# Altium schematic symbol library MacroPlay.SchLib: 48 symbols (part 1 of 2)
Pins are listed as number, name and electrical type; pins without a type are passive.

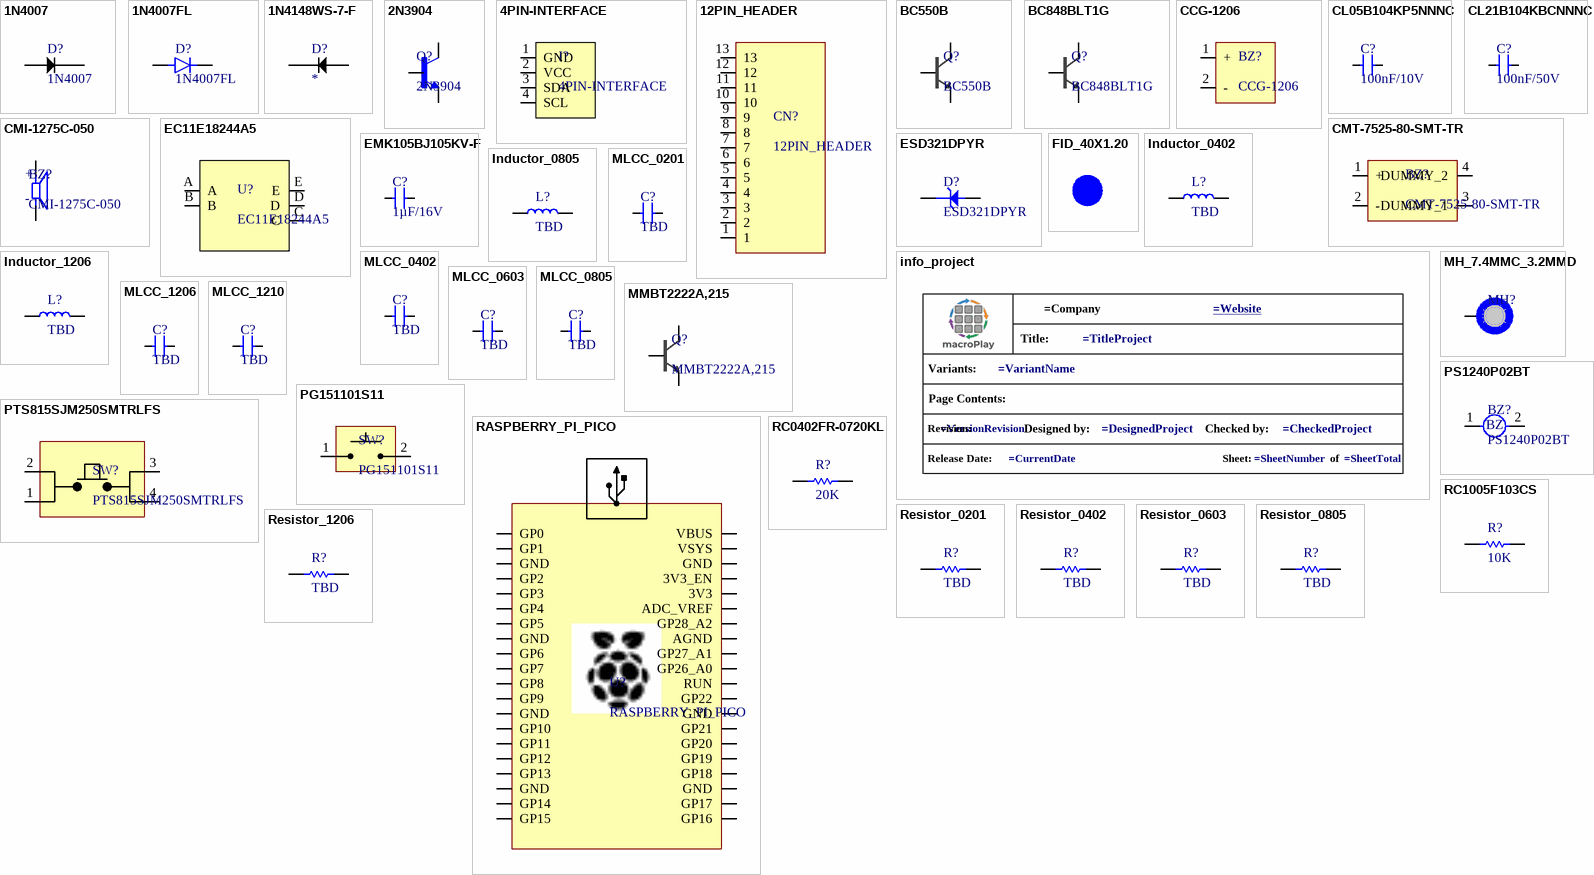
[diagram p0: symbols 1N4007 to Resistor_1206]

## 1N4007
designator D?
DIODE - Rectifier Diode, 1 Phase, 1 Element, 1A, 1000V V(RRM), Silicon, DO-204AC; Manufacturer: Diotec; Manufacturer Lifecycle Status: ACTIVE; Value: 15pF; Element Configuration: Single; Forward Voltage: 1V; Max Forward Surge Current (Ifsm): 30A; Max Junction Temperature (Tj): 175°C; Max Repetitive Reverse Voltage (Vrrm): 1kV; Max Surge Current: 27A; Number of Elements: 1; Peak Reverse Current: 5µA; Polarity: Standard; Reverse Recovery Time: 1.5µs; .Mounting: PTH; Supplier: Arrow Electronics; Supplier Part Number: 1N4007; Manufacturer Part Number: 1N4007; RoHS: Compliant; Category: Rectifier Diodes; Stock: 2542; Pricing: 1=0,1243, 10=0,0773, 100=0,0477, 500=0,0345, 1000=0,0301, 2000=0,0264 (USD); Case/Package: Axial; Export Control Classification Number (ECCN) Code: EAR99; Forward Current: 1A; Height: 2.8mm; Harmonized Tariff Schedule (HTS) Code: 85411000; Introduction Date: 1988-05-01; Lifecycle Status: Production; Max Operating Temperature: 175°C; Max Output current: 1A; Min Operating Temperature: -50°C; Mounting Technology: Axial; Pins: 2; Number of Terminals: 2; Peak Non-Repetitive Surge Current: 30A; REACH SVHC: Unknown; Reverse Standoff Voltage: 1kV; Reverse Voltage: 1kV; Weight: 300mg; ComponentLink1URL: https://datasheet.octopart.com:443/1N4007-Diotec-datasheet-180572013.pdf?src-supplier=IHS; ComponentLink1Description: https://datasheet.octopart.com:443/1N4007-Diotec-datasheet-180572013.pdf?src-supplier=IHS; ComponentLink2URL: https://datasheet.octopart.com:443/1N4007-Diotec-datasheet-180725457.pdf?src-supplier=IHS; ComponentLink2Description: https://datasheet.octopart.com:443/1N4007-Diotec-datasheet-180725457.pdf?src-supplier=IHS; ComponentLink3URL: https://datasheet.octopart.com:443/1N4007-Diotec-datasheet-182232370.pdf?src-supplier=IHS; ComponentLink3Description: https://datasheet.octopart.com:443/1N4007-Diotec-datasheet-182232370.pdf?src-supplier=IHS; ComponentLink4URL: https://datasheet.octopart.com:443/1N4007-Diotec-datasheet-180570705.pdf?src-supplier=IHS; ComponentLink4Description: https://datasheet.octopart.com:443/1N4007-Diotec-datasheet-180570705.pdf?src-supplier=IHS; ComponentLink5URL: https://datasheet.octopart.com:443/1N4007-Diotec-datasheet-62346875.pdf?src-supplier=Burklin+Elektronik; ComponentLink5Description: https://datasheet.octopart.com:443/1N4007-Diotec-datasheet-62346875.pdf?src-supplier=Burklin+Elektronik; ComponentLink6URL: https://datasheet.octopart.com:443/1N4007-Diotec-datasheet-168809440.pdf?src-supplier=Diotec; ComponentLink6Description: https://datasheet.octopart.com:443/1N4007-Diotec-datasheet-168809440.pdf?src-supplier=Diotec; ComponentLink7URL: https://datasheet.octopart.com:443/1N4007-Diotec-datasheet-114842631.pdf?src-supplier=SOS+electronic; ComponentLink7Description: https://datasheet.octopart.com:443/1N4007-Diotec-datasheet-114842631.pdf?src-supplier=SOS+electronic; ComponentLink8URL: https://datasheet.octopart.com:443/1N4007-Galaxy-Semiconductor-datasheet-20771558.pdf?src-supplier=TME; ComponentLink8Description: https://datasheet.octopart.com:443/1N4007-Galaxy-Semiconductor-datasheet-20771558.pdf?src-supplier=TME; ComponentLink9URL: https://datasheet.octopart.com:443/1N4007-Diotec-datasheet-118605333.pdf?src-supplier=TME; ComponentLink9Description: https://datasheet.octopart.com:443/1N4007-Diotec-datasheet-118605333.pdf?src-supplier=TME; ComponentLink10URL: https://datasheet.octopart.com:443/1N4007-Diotec-datasheet-159114366.pdf?src-supplier=TME; ComponentLink10Description: https://datasheet.octopart.com:443/1N4007-Diotec-datasheet-159114366.pdf?src-supplier=TME; ComponentLink11URL: https://datasheet.octopart.com:443/1N4007-Diotec-datasheet-189099566.pdf?src-supplier=Master+Electronics; ComponentLink11Description: https://datasheet.octopart.com:443/1N4007-Diotec-datasheet-189099566.pdf?src-supplier=Master+Electronics; .SCHChecked: *; .PCBChecked: *
footprint DIOAD1060W80L520D270
pins: A 2, C 1

## 1N4007FL
designator D?
Diode - Standard 1000 V 1A Surface Mount SOD-123FL; MF: SMC Diode Solutions; SnapEDA_Link: https://www.snapeda.com/parts/1N4007FL/SMC/view-part/?ref=snap; Package: None; Value: *; MP: 1N4007FL; Check_prices: https://www.snapeda.com/parts/1N4007FL/SMC/view-part/?ref=eda
footprint SODFL3618X110N
pins: 1 K, 2 A

## 1N4148WS-7-F
designator D?
DIODE - Diode 75 V 150mA Surface Mount SOD-323; Manufacturer_Name: Diodes Incorporated; Manufacturer_Part_Number: 1N4148WS-7-F; Datasheet Link: https://www.diodes.com//assets/Datasheets/1N4148WS_BAV16WS.pdf; Height: 1.2mm; Mouser Part Number: 621-1N4148WS-F; Mouser Price/Stock: https://www.mouser.co.uk/ProductDetail/Diodes-Incorporated/1N4148WS-7-F?qs=4drIV0IxA0r8aNy7%2Fu4kVw%3D%3D; Arrow Part Number: 1N4148WS-7-F; Arrow Price/Stock: https://www.arrow.com/en/products/1n4148ws-7-f/diodes-incorporated?utm_currency=USD&region=europe
footprint SOD2513X120N
pins: 1, 2

## 2N3904
designator Q?
TRANS - NPN 40V 200MA TO92-3; MF: Rectron; SnapEDA_Link: https://www.snapeda.com/parts/2N3904/Rectron/view-part/?ref=snap; Package: TO-226-3 Rectron; MP: 2N3904; Check_prices: https://www.snapeda.com/parts/2N3904/Rectron/view-part/?ref=eda; Purchase-URL: https://pricing.snapeda.com/search/part/2N3904/?ref=eda; Price: None; Value: *; Availability: In Stock
footprint TO92127P495H495-3
pins: 1 E, 2 B, 3 C

## 4PIN-INTERFACE
designator I?
SMD Pad to interface with I2C/SPI data peripherals; .SCHChecked: *; .PCBChecked: *; .Mounting: SMD
footprint 4PIN_INTERFACE
pins: 1 GND, 2 VCC, 3 SDA, 4 SCL

## 12PIN_HEADER
designator CN?
12PIN HEADER CONNECTOR
footprint 12PINHEADER
pins: 1, 2, 3, 4, 5, 6, 7, 8, 9, 10, 11, 12, 13

## BC550B
designator Q?
TRANS - NPN Bipolar (BJT) Transistor 45 V 100 mA 300MHz 500 mW Through Hole TO-92-3; MF: ON; .Mounting: PTH; SnapEDA_Link: https://www.snapeda.com/parts/BC550B/Onsemi/view-part/?ref=snap; Package: E-PKG AXIAL-LEADED-2 ON Semiconductor; Value: *; MP: BC550B; Check_prices: https://www.snapeda.com/parts/BC550B/Onsemi/view-part/?ref=eda; .SCHChecked: *; .PCBChecked: *
footprint TO92-
pins: 1 E, 2 B, 3 C

## BC848BLT1G
designator Q?
TRANS - NPN 30V 100mA 300mW SOT23-3.; Manufacturer 1: ON Semiconductor; Emitter Base Voltage (VEBO): 5V; Collector Emitter Saturation Voltage: 600mV; Transition Frequency: 100MHz; hFE Min: 200; Number of Elements: 1; Description 1: NPN Ic=100mA Vceo=30V hfe=200~450 P=225mW SOT-23; Category 1: BJTs; .Mounting: SMT; .PCBChecked: Lucas Vieira; Case/Package: SOT-23-3; Pins: 3; Contact Plating: Tin,Matte; Min Operating Temperature: -55°C; Max Operating Temperature: 150°C; Packaging: Tape and Reel; Polarity: NPN; Collector Emitter Breakdown Voltage: 30V; Max Power Dissipation: 300mW; Package Quantity: 3000; Collector Base Voltage (VCBO): 30V; Max Collector Current: 100mA; Max Breakdown Voltage: 30V; Power Dissipation: 300mW; Clock Frequency: 100MHz; Voltage Rating (DC): 30V; Current Rating: 100mA; Collector-emitter Voltage-Max: 600mV; Series: -; Collector Emitter Voltage (VCEO): 30V; Frequency: 100MHz; Gain Bandwidth Product: 100MHz; Length: 2.9mm; Width: 1.3mm; Height: 0.94mm; Radiation Hardening: No; Lead Free: Lead Free; Reach SVHC Compliant: No; RoHS Compliant: Yes; ComponentLink1URL: https://datasheet.ciiva.com/15139/getdatasheetpartid-87781-15139134.pdf?src-supplier=Verical; ComponentLink1Description: https://datasheet.ciiva.com/15139/getdatasheetpartid-87781-15139134.pdf?src-supplier=Verical; ComponentLink2URL: https://datasheet.ciiva.com/7971/bc846alt1-d-7971962.pdf?src-supplier=Element14; ComponentLink2Description: https://datasheet.ciiva.com/7971/bc846alt1-d-7971962.pdf?src-supplier=Element14; ComponentLink3URL: https://datasheet.ciiva.com/7971/bc846alt1-d-7971960.pdf?src-supplier=Element14; ComponentLink3Description: https://datasheet.ciiva.com/7971/bc846alt1-d-7971960.pdf?src-supplier=Element14; ComponentLink4URL: https://datasheet.ciiva.com/11204/bc846alt1-d-11204358.pdf?src-supplier=Avnet; ComponentLink4Description: https://datasheet.ciiva.com/11204/bc846alt1-d-11204358.pdf?src-supplier=Avnet; ComponentLink5URL: https://datasheet.ciiva.com/11198/bc846alt1-d-11198026.pdf?src-supplier=Avnet; ComponentLink5Description: https://datasheet.ciiva.com/11198/bc846alt1-d-11198026.pdf?src-supplier=Avnet; ComponentLink6URL: https://datasheet.ciiva.com/976/bc846alt1-d-976387.pdf?src-supplier=Digi-Key; ComponentLink6Description: https://datasheet.ciiva.com/976/bc846alt1-d-976387.pdf?src-supplier=Digi-Key; ComponentLink7URL: https://datasheet.ciiva.com/976/bc846alt1-d-976388.pdf?src-supplier=Digi-Key; ComponentLink7Description: https://datasheet.ciiva.com/976/bc846alt1-d-976388.pdf?src-supplier=Digi-Key; ComponentLink8URL: https://datasheet.ciiva.com/976/bc846alt1-d-976386.pdf?src-supplier=Digi-Key; ComponentLink8Description: https://datasheet.ciiva.com/976/bc846alt1-d-976386.pdf?src-supplier=Digi-Key; Supplier 1: Digi-Key; Supplier Part Number 1: BC848BLT1GOSCT-ND; Manufacturer Part Number 1: BC848BLT1G; RoHS 1: Yes; Stock 1: 199953; Pricing 1: 1=0,14, 10=0,131, 100=0,0712, 500=0,04384, 1000=0,02989 (USD); Manufacturer 2: ON Semiconductor; Manufacturer Part Number 2: SBC848BLT1G; Manufacturer 3: Nexperia USA Inc.; Manufacturer Part Number 3: BC848B,215; .SCHChecked: Lucas Vieira
footprint SOT-23-3 (SOT23, 3-Leads, Body 2,90x2,40mm, Pitch 1,05mm, IPC Medium Density)
pins: 1 Base, 2 Emitter, 3 Collector

## CCG-1206
designator BZ?
BUZZER - 12 mm, 5 V, 85 dB, Through Hole, Sealed, Magnetic Audio Transducer Buzzer; MF: Same Sky; .Mounting: PTH; SnapEDA_Link: https://www.snapeda.com/parts/CCG-1206/Same+Sky/view-part/?ref=snap; Package: None; Value: *; MP: CCG-1206; Check_prices: https://www.snapeda.com/parts/CCG-1206/Same+Sky/view-part/?ref=eda; .SCHChecked: *; .PCBChecked: *
footprint CUI_CCG-1206
pins: 1 +, 2 -

## CL05B104KP5NNNC
designator C?, comment 100nF/10V
MLCC - 100nF 10V X7R 0402 ±10%; Manufacturer 1: Samsung; Manufacturer Part Number 1: CL05B104KP5NNNC; Dielectric Material: Ceramic; Multilayer: Yes; .Mounting: SMT; Supplier: Digikey; Supplier Part Number: 1276-1002-1-ND; RoHS: Yes; Category: Ceramic Capacitors; Stock: 29591550; Pricing: 1=0,08, 10=0,004, 100=0,0036, 1000=0,0032 (USD); Mounting Technology: Surface Mount; Pins: 2; Package Shape: Rectangular; Case/Package: 0402; Terminal Finish: Nickel; Min Operating Temperature: -55°C; Max Operating Temperature: 125°C; JESD-609 Code: e3; Value: 100nF; Capacitor Type: Ceramic; Tolerance  (fill in as +-): 10%; Package Style: SMTMeter; Packaging: Tape and Reel; Tolerance (fill in as +-): 10%; Rated DC Voltage (URdc): 10V; Temperature Characteristics Code: X7R; Termination: Wraparound; Length: 1mm; Width: 0.5mm; Height: 0.5mm; Reach SVHC Compliant: Yes; RoHS Compliant: Yes; ComponentLink1URL: https://datasheet.ciiva.com:443/pdfs/VipMasterIC/IC/SEMS/SEMS-S-A0008523115/SEMS-S-A0008523129-1.pdf?src-supplier=IHS+Markit; ComponentLink1Description: https://datasheet.ciiva.com:443/pdfs/VipMasterIC/IC/SEMS/SEMS-S-A0008523115/SEMS-S-A0008523129-1.pdf?src-supplier=IHS+Markit; ComponentLink2URL: https://datasheet.ciiva.com/15165/getdatasheetpartid-37100-15165107.pdf?src-supplier=Verical; ComponentLink2Description: https://datasheet.ciiva.com/15165/getdatasheetpartid-37100-15165107.pdf?src-supplier=Verical; ComponentLink3URL: https://datasheet.ciiva.com/16498/cl05b104kq5nnnc-16498491.pdf?src-supplier=Future+Electronics; ComponentLink3Description: https://datasheet.ciiva.com/16498/cl05b104kq5nnnc-16498491.pdf?src-supplier=Future+Electronics; .PCBChecked: *; .SCHChecked: *
footprint C0402 - Iron Soldering (C0402 but easier to solder with iron solder instead of an furnace or heat bed)
pins: 1, 2

## CL21B104KBCNNNC
designator C?, comment 100nF/50V
MLCC - 100nF 50V X7R 0805 ±10%; Manufacturer: Samsung Electro-Mechanics; Manufacturer Part Number: CL21B104KBCNNNC; Dielectric Material: Ceramic; .Mounting: SMD; Supplier: Future Electronics; Supplier Part Number: CL21B104KBCNNNC; RoHS: Compliant; Category: Ceramic Capacitors; Stock: 6136000; Pricing: 4000=0,0059, 16000=0,0057, 60000=0,0055, 100000=0,0054, 200000=0,0052 (USD); Value: 100nF; Case/Package: 0805; Case Code (Imperial): 0805; Case Code (Metric): 2012; China RoHS: Compliant; Contact Plating: Tin; Country of Origin: Mainland China, Philippines, South Korea; Depth: 1.25mm; Dielectric: X7R; Export Control Classification Number (ECCN) Code: EAR99; Height: 950µm; Harmonized Tariff Schedule (HTS) Code: 8532.24.00.20; Introduction Date: 2009-07-27; Lead Free: Lead Free; Length: 2mm; Lifecycle Status: Production; Material: Ceramic; Max Operating Temperature: 125°C; Min Operating Temperature: -55°C; Mounting Technology: Surface Mount; Number of Terminals: 2; Radiation Hardening: No; REACH SVHC: Yes; Schedule B: 8532240020, 8532240020|8532240020, 8532240020|8532240020|8532240020, 8532240020|8532240020|8532240020|8532240020; Thickness: 939.8µm; Tolerance: 10%; Voltage: 50V; Voltage Rating: 50V; Voltage Rating (DC): 50V; Width: 1.25mm; ComponentLink1URL: https://datasheet.octopart.com:443/CL21B104KBCNNNC-Samsung-Electro-Mechanics-datasheet-137745078.pdf?src-supplier=IHS; ComponentLink1Description: https://datasheet.octopart.com:443/CL21B104KBCNNNC-Samsung-Electro-Mechanics-datasheet-137745078.pdf?src-supplier=IHS; ComponentLink2URL: https://datasheet.octopart.com/CL21B104KBCNNNC-Samsung-Electro-Mechanics-datasheet-8324245.pdf; ComponentLink2Description: https://datasheet.octopart.com/CL21B104KBCNNNC-Samsung-Electro-Mechanics-datasheet-8324245.pdf; ComponentLink3URL: https://datasheet.octopart.com/CL21B104KBCNNNC-Samsung-Electro-Mechanics-datasheet-97040617.pdf; ComponentLink3Description: https://datasheet.octopart.com/CL21B104KBCNNNC-Samsung-Electro-Mechanics-datasheet-97040617.pdf; ComponentLink4URL: https://datasheet.octopart.com/General-Multilayer-Ceramic-Capacitors-Samsung-datasheet-family-111.pdf; ComponentLink4Description: https://datasheet.octopart.com/General-Multilayer-Ceramic-Capacitors-Samsung-datasheet-family-111.pdf; ComponentLink5URL: https://datasheet.octopart.com:443/CL21B104KBCNNNC-Samsung-Electro-Mechanics-datasheet-11548950.pdf?src-supplier=Future+Electronics; ComponentLink5Description: https://datasheet.octopart.com:443/CL21B104KBCNNNC-Samsung-Electro-Mechanics-datasheet-11548950.pdf?src-supplier=Future+Electronics; ComponentLink6URL: https://datasheet.octopart.com:443/CL21B104KBCNNNC-Samsung-Electro-Mechanics-datasheet-116891032.pdf?src-supplier=Future+Electronics; ComponentLink6Description: https://datasheet.octopart.com:443/CL21B104KBCNNNC-Samsung-Electro-Mechanics-datasheet-116891032.pdf?src-supplier=Future+Electronics; ComponentLink7URL: https://datasheet.octopart.com:443/CL21B104KBCNNNC-Samsung-Electro-Mechanics-datasheet-81462175.pdf?src-supplier=Future+Electronics; ComponentLink7Description: https://datasheet.octopart.com:443/CL21B104KBCNNNC-Samsung-Electro-Mechanics-datasheet-81462175.pdf?src-supplier=Future+Electronics; ComponentLink8URL: https://datasheet.octopart.com:443/CL21B104KBCNNNC-Samsung-datasheet-42485244.pdf?src-supplier=Future+Electronics; ComponentLink8Description: https://datasheet.octopart.com:443/CL21B104KBCNNNC-Samsung-datasheet-42485244.pdf?src-supplier=Future+Electronics; ComponentLink9URL: https://datasheet.octopart.com:443/CL21B104KBCNNNC-Samsung-Electro-Mechanics-datasheet-149045937.pdf?src-supplier=Future+Electronics; ComponentLink9Description: https://datasheet.octopart.com:443/CL21B104KBCNNNC-Samsung-Electro-Mechanics-datasheet-149045937.pdf?src-supplier=Future+Electronics; ComponentLink10URL: https://datasheet.octopart.com:443/CL21B104KBCNNNC-Samsung-datasheet-8326407.pdf?src-supplier=TME; ComponentLink10Description: https://datasheet.octopart.com:443/CL21B104KBCNNNC-Samsung-datasheet-8326407.pdf?src-supplier=TME; ComponentLink11URL: http://sigma.octopart.com:80/rohs_certificate/General-Multilayer-Ceramic-Capacitors-Samsung-family-110.pdf?src-supplier=Compliance+Statements; ComponentLink11Description: http://sigma.octopart.com:80/rohs_certificate/General-Multilayer-Ceramic-Capacitors-Samsung-family-110.pdf?src-supplier=Compliance+Statements; ComponentLink12URL: http://sigma.octopart.com:80/rohs_statement/General-Multilayer-Ceramic-Capacitors-Samsung-family-132.pdf?src-supplier=Compliance+Statements; ComponentLink12Description: http://sigma.octopart.com:80/rohs_statement/General-Multilayer-Ceramic-Capacitors-Samsung-family-132.pdf?src-supplier=Compliance+Statements; ComponentLink13URL: http://sigma.octopart.com:80/reach_statement/General-Multilayer-Ceramic-Capacitors-Samsung-family-133.pdf?src-supplier=Compliance+Statements; ComponentLink13Description: http://sigma.octopart.com:80/reach_statement/General-Multilayer-Ceramic-Capacitors-Samsung-family-133.pdf?src-supplier=Compliance+Statements; .SCHChecked: *; .PCBChecked: *
footprint C0805 - ironsoldering
pins: 1, 2

## CMI-1275C-050
designator BZ?
12 mm, 5 Vdc, 90 dB, 3.1 kHz, Through Hole, Magnetic Audio Indicator Buzzer; MF: Same Sky; SnapEDA_Link: https://www.snapeda.com/parts/CMI-1275C-050/Same+Sky/view-part/?ref=snap; Package: None; Value: *; MP: CMI-1275C-050; Check_prices: https://www.snapeda.com/parts/CMI-1275C-050/Same+Sky/view-part/?ref=eda
footprint CUI_CMI-1275C-050
pins: N, P
text: +; -

## CMT-7525-80-SMT-TR
designator BZ?
BUZZER - Buzzers Transducer, Externally Driven Magnetic 3.6 V 100mA 2.73kHz 80dB @ 3.6V, 10cm Surface Mount Solder Pads; Manufacturer_Name: Same Sky; Datasheet Link: https://www.sameskydevices.com/product/resource/CMT-7525-80-SMT-TR.pdf; Height: 2.7mm; Manufacturer_Part_Number: CMT-7525-80-SMT-TR; Mouser Part Number: 490-CMT-7525-80SMTTR; Mouser Price/Stock: https://www.mouser.co.uk/ProductDetail/Same-Sky/CMT-7525-80-SMT-TR?qs=P1JMDcb91o5izP7Xira9ww%3D%3D; Arrow Part Number: CMT-7525-80-SMT-TR; Arrow Price/Stock: https://www.arrow.com/en/products/cmt-7525-80-smt-tr/cui-devices?region=nac
footprint CMT752580SMTTR
pins: 1 +, 2 -, 3 DUMMY_1, 4 DUMMY_2

## EC11E18244A5
designator U?
ENCODER - Rotary Encoder Incremental 18 Quadrature (Incremental) Vertical; Manufacturer 1: Alps Electric; Copyright: Copyright (C) 2025 Ultra Librarian. All rights reserved.; Manufacturer Part Number 1: EC11E18244A5; RefDes: RefDes; Type: Type; .SCHChecked: *; .PCBChecked: *; .Mounting: *
footprint EC11E18244A5_ALPS
pins: A, B, C, D, E

## EMK105BJ105KV-F
designator C?, comment 1µF/16V
MLCC - 1µF 16V 0402 X5R ±10%.; Manufacturer 1: Taiyo Yuden; Manufacturer Part Number 1: EMK105BJ105KV-F; Dielectric Material: Ceramic; Value: 1uF; Multilayer: Yes; Tolerance  (fill in as +-): 10%; .Mounting: SMT; Supplier 1: Avnet; Supplier Part Number 1: 84R9109; RoHS: Yes; Category: Ceramic Capacitors; Stock: 100000; Pricing: 10000=0,007, 20000=0,008 (USD); Mounting Technology: Surface Mount; Pins: 2; Package Shape: Rectangular; Case/Package: 0402; Terminal Finish: Nickel; Min Operating Temperature: -55°C; Max Operating Temperature: 85°C; JESD-609 Code: e3; Capacitor Type: Ceramic; Package Style: SMTMeter; Packaging: Tape and Reel; Tolerance (fill in as +-): 10%; Rated DC Voltage (URdc): 16V; Temperature Characteristics Code: X5R; Termination: Wraparound; Length: 1mm; Width: 0.5mm; Height: 0.5mm; Reach SVHC Compliant: Yes; RoHS Compliant: Yes; ComponentLink1URL: https://datasheet.ciiva.com:443/pdfs/VipMasterIC/IC/TAIY/TAIY-S-A0009096450/TAIY-S-A0009096597-1.pdf?src-supplier=IHS+Markit; ComponentLink1Description: https://datasheet.ciiva.com:443/pdfs/VipMasterIC/IC/TAIY/TAIY-S-A0009096450/TAIY-S-A0009096597-1.pdf?src-supplier=IHS+Markit; ComponentLink2URL: https://datasheet.ciiva.com/134/emk105bj105kv-f-ss-134209.pdf?src-supplier=Digikey; ComponentLink2Description: https://datasheet.ciiva.com/134/emk105bj105kv-f-ss-134209.pdf?src-supplier=Digikey; ComponentLink3URL: https://datasheet.ciiva.com/30259/265emk105bj105kv-f-30259872.pdf?src-supplier=Onlinecomponents.com; ComponentLink3Description: https://datasheet.ciiva.com/30259/265emk105bj105kv-f-30259872.pdf?src-supplier=Onlinecomponents.com; ComponentLink4URL: https://datasheet.ciiva.com/15920/964emk105bj105kv-f-15920402.pdf?src-supplier=Onlinecomponents.com; ComponentLink4Description: https://datasheet.ciiva.com/15920/964emk105bj105kv-f-15920402.pdf?src-supplier=Onlinecomponents.com; ComponentLink5URL: https://datasheet.ciiva.com/26871/getdatasheetpartid-638287-26871289.pdf?src-supplier=Verical; ComponentLink5Description: https://datasheet.ciiva.com/26871/getdatasheetpartid-638287-26871289.pdf?src-supplier=Verical; ComponentLink6URL: https://datasheet.ciiva.com/5424/mlcc01-e-5424190.pdf?src-supplier=Mouser; ComponentLink6Description: https://datasheet.ciiva.com/5424/mlcc01-e-5424190.pdf?src-supplier=Mouser; ComponentLink7URL: https://datasheet.ciiva.com/22694/1497285-22694239.pdf?src-supplier=Element14; ComponentLink7Description: https://datasheet.ciiva.com/22694/1497285-22694239.pdf?src-supplier=Element14; ComponentLink8URL: https://datasheet.ciiva.com/7657/1497285-7657320.pdf?src-supplier=Element14; ComponentLink8Description: https://datasheet.ciiva.com/7657/1497285-7657320.pdf?src-supplier=Element14; .PCBChecked: *; .SCHChecked: *
footprint C0402 - Iron Soldering (C0402 but easier to solder with iron solder instead of an furnace or heat bed)
pins: 1, 2

## ESD321DPYR
designator D?
DIODE - TVS UNI-DIR 3.6V, 4.5V, 6.8V, 6A, 0.9pF.; Manufacturer 1: Texas Instruments; Description 1: ESD Suppressor Diode TVS Uni-Dir 3.6V 2-Pin X1SON T/R; Category 1: TVS Diodes; .Mouting: SMT; .SCHChecked: Lucas Vieira; RoHS Compliant: Yes; ComponentLink1URL: http://www.ti.com/general/docs/suppproductinfo.tsp?distId=10&amp;gotoUrl=http%3A%2F%2Fwww.ti.com%2Flit%2Fgpn%2Fesd321&src-supplier=Digi-Key; ComponentLink1Description: http://www.ti.com/general/docs/suppproductinfo.tsp?distId=10&amp;gotoUrl=http%3A%2F%2Fwww.ti.com%2Flit%2Fgpn%2Fesd321&src-supplier=Digi-Key; Supplier 1: Digi-Key; Supplier Part Number 1: 296-51108-1-ND; Manufacturer Part Number 1: ESD321DPYR; RoHS 1: Yes; Stock 1: 172519; Pricing 1: 1=0,37000, 10=0,29900, 100=0,20350, 500=0,15264, 1000=0,11448, 2000=0,10494, 5000=0,09858 (USD); Manufacturer 2: Texas Instruments; Manufacturer Part Number 2: ESD351DPYR; .PCBChecked: Lucas Vieira; Manufacturer 3: Panjit International Inc.; Manufacturer Part Number 3: PE1605M1Q_R1_00001; .Mounting: SMT
footprint ESD321DPYR
pins: 1, 2

## FID_40X1.20
designator FID?  (value not drawn)  (no BOM)
Fiducials
footprint FID_40X1.20

## Inductor_0402
designator L?, comment TBD
INDUCTOR - TBD 0402
footprint L0402
pins: 1, 2

## Inductor_0805
designator L?, comment TBD
INDUCTOR - TBD 0805
footprint L0805
pins: 1, 2

## Inductor_1206
designator L?, comment TBD
INDUCTOR - TBD 1206
footprint L1206 (Chip Capacitor, 2-Leads, Body 3.20x1.60mm, IPC Medium Density)
pins: 1, 2

## info_project
designator GPH?  (value not drawn)  (graphical)
GRAPHICAL - Info Project
text: Title:; Variants:; Page Contents:; Revision:; Designed by:; Checked by:; Release Date:; Sheet:; of

## MH_7.4MMC_3.2MMD
designator MH?  (value not drawn)  (no BOM)
Mounting Hole 7.4mm Diameter 3.2mm Drill
footprint MH_7.4MMC_3.2MMD
pins: 1

## MLCC_0201
designator C?, comment TBD
MLCC - TBD 0201
footprint C0201
pins: 1, 2

## MLCC_0402
designator C?, comment TBD
MLCC - TBD 0402
footprint C0402
pins: 1, 2

## MLCC_0603
designator C?, comment TBD
MLCC - TBD 0603
footprint C0603
pins: 1, 2

## MLCC_0805
designator C?, comment TBD
MLCC - TBD 0805
footprint C0805
pins: 1, 2

## MLCC_1206
designator C?, comment TBD
MLCC - TBD 1206
footprint C1206 (Chip Capacitor, 2-Leads, Body 3.20x1.60mm, IPC Medium Density)
pins: 1, 2

## MLCC_1210
designator C?, comment TBD
MLCC - TBD 1210
footprint C1210
pins: 1, 2

## MMBT2222A,215
designator Q?
TRANS - Single Bipolar Transistor, NPN, 40 V, 600 mA, 250 mW, SOT-23 (TO-236AB), 3 Pins, Surface Mount; Manufacturer: Nexperia; Manufacturer Lifecycle Status: RELEASED FOR SUPPLY; Collector Base Voltage (VCBO): 75V; Collector Emitter Breakdown Voltage: 40V; Collector Emitter Saturation Voltage: 1V; Emitter Base Voltage (VEBO): 6V; Frequency: 300MHz; hFE Min: 40; Max Collector Current: 600mA; Max Junction Temperature (Tj): 150°C; Max Power Dissipation: 250mW; Number of Elements: 1; Supplier: Newark; Supplier Part Number: MMBT2222A,215; Manufacturer Part Number: MMBT2222A,215; RoHS: Compliant; Category: BJTs; Stock: 23090; Pricing: 1=0,269, 10=0,167, 25=0,145, 50=0,124 (USD); Ambient Temperature Range High: 150°C; Case/Package: SOT-23; China RoHS: Compliant; Collector Emitter Voltage (VCEO): 40V; Contact Plating: Tin; Country of Origin: Mainland China, Malaysia; Export Control Classification Number (ECCN) Code: EAR99; Element Configuration: Single; Gain Bandwidth Product: 300MHz; Height: 1.1mm; Introduction Date: 2003-04-28; Lead Free: Lead Free; Length: 3mm; Lifecycle Status: Production; Max Breakdown Voltage: 40V; Clock Frequency: 300MHz; Max Operating Temperature: 150°C; Min Operating Temperature: -65°C; Mounting Technology: Surface Mount; Pins: 3; Number of Terminals: 3; Polarity: NPN; Power Dissipation: 250mW; Radiation Hardening: No; Ratings: AEC-Q101; REACH SVHC: Yes; Schedule B: 8541210080, 8541210080|8541210080|8541210080|8541210080|8541210080; Termination: SMD/SMT; Transition Frequency: 300MHz; Weight: 4.535924g; Width: 1.4mm; ComponentLink1URL: https://sigma.octopart.com:443/138797052/technical_drawing/Nexperia-MMBT2222A%2C215.pdf?src-supplier=Upverter; ComponentLink1Description: https://sigma.octopart.com:443/138797052/technical_drawing/Nexperia-MMBT2222A%2C215.pdf?src-supplier=Upverter; ComponentLink2URL: https://datasheet.octopart.com:443/MMBT2222A%2C215-Nexperia-datasheet-87581373.pdf?src-supplier=LKR; ComponentLink2Description: https://datasheet.octopart.com:443/MMBT2222A%2C215-Nexperia-datasheet-87581373.pdf?src-supplier=LKR; ComponentLink3URL: https://datasheet.octopart.com:443/MMBT2222A%2C215-Nexperia-datasheet-8386369.pdf?src-supplier=element14+APAC; ComponentLink3Description: https://datasheet.octopart.com:443/MMBT2222A%2C215-Nexperia-datasheet-8386369.pdf?src-supplier=element14+APAC; ComponentLink4URL: https://datasheet.octopart.com:443/MMBT2222A%2C215-Nexperia-datasheet-8884867.pdf?src-supplier=element14+APAC; ComponentLink4Description: https://datasheet.octopart.com:443/MMBT2222A%2C215-Nexperia-datasheet-8884867.pdf?src-supplier=element14+APAC; ComponentLink5URL: https://datasheet.octopart.com:443/MMBT2222A%2C215-Nexperia-datasheet-180923983.pdf?src-supplier=IHS; ComponentLink5Description: https://datasheet.octopart.com:443/MMBT2222A%2C215-Nexperia-datasheet-180923983.pdf?src-supplier=IHS; ComponentLink6URL: https://datasheet.octopart.com:443/MMBT2222A%2C215-Philips-datasheet-14064901.pdf?src-supplier=iiiC; ComponentLink6Description: https://datasheet.octopart.com:443/MMBT2222A%2C215-Philips-datasheet-14064901.pdf?src-supplier=iiiC; ComponentLink7URL: http://sigma.octopart.com:80/reach_statement/NXP-Semiconductors-company-13.pdf?src-supplier=Compliance+Statements; ComponentLink7Description: http://sigma.octopart.com:80/reach_statement/NXP-Semiconductors-company-13.pdf?src-supplier=Compliance+Statements; ComponentLink8URL: http://sigma.octopart.com:80/rohs_statement/NXP-Semiconductors-company-12.pdf?src-supplier=Compliance+Statements; ComponentLink8Description: http://sigma.octopart.com:80/rohs_statement/NXP-Semiconductors-company-12.pdf?src-supplier=Compliance+Statements
footprint SOT-23-3 (SOT23, 3-Leads, Body 2,90x2,40mm, Pitch 1,05mm, IPC Medium Density)
pins: 1 B, 2 E, 3 C

## PG151101S11
designator SW?
SWITCH - Kailh socket for hotswap mechanical switches; .Mounting: SMD; SnapEDA_Link: https://www.snapeda.com/parts/PG151101S11/Kailh/view-part/?ref=snap; Package: Package; Value: *; MF: Kailh; MP: PG151101S11; Check_prices: https://www.snapeda.com/parts/PG151101S11/Kailh/view-part/?ref=eda; .PCBChecked: *; .SCHChecked: *
footprint SW_PG151101S11
pins: 1, 2

## PS1240P02BT
designator BZ?
BUZZER - Buzzers Transducer, Externally Driven Piezo 3V 4kHz 60dB @ 3V, 10cm Through Hole PC Pins; MF: TDK; MP: PS1240P02BT; Availability: Unavailable; Package: 2020 TDK; Value: *; Price: None; SnapEDA_Link: https://www.snapeda.com/parts/PS1240P02BT/TDK/view-part/53420/?ref=snap
footprint XDCR_PS1240P02BT
pins: 1, 2
text: BZ

## PTS815SJM250SMTRLFS
designator SW?
SWITCH - Tactile Switch SPST-NO Top Actuated Surface Mount; Manufacturer 1: ITT C&K; .Mounting: SMT; Supplier: Digikey; Supplier Part Number: CKN12215-1-ND; Manufacturer Part Number 1: PTS815SJM250SMTRLFS; RoHS: Yes; Category: Tactile Switches; Stock: 10550; Pricing: 1=0,22, 10=0,191, 25=0,1788, 100=0,1606, 250=0,14892, 500=0,14052, 1000=0,13263 (USD); ComponentLink1URL: https://datasheet.octopart.com/PTS815-SJM-250-SMTR-LFS-C%26K-Components-datasheet-175421037.pdf?src-supplier=Element14; ComponentLink1Description: https://datasheet.octopart.com/PTS815-SJM-250-SMTR-LFS-C%26K-Components-datasheet-175421037.pdf?src-supplier=Element14; ComponentLink2URL: https://dznh3ojzb2azq.cloudfront.net/products/Tactile/PTS815/documents/datasheet.pdf?src-supplier=Digikey; ComponentLink2Description: https://dznh3ojzb2azq.cloudfront.net/products/Tactile/PTS815/documents/datasheet.pdf?src-supplier=Digikey; ComponentLink3URL: https://datasheet.octopart.com/PTS815-SJM-250-SMTR-LFS-C%26K-Components-datasheet-175421037.pdf?src-supplier=Farnell; ComponentLink3Description: https://datasheet.octopart.com/PTS815-SJM-250-SMTR-LFS-C%26K-Components-datasheet-175421037.pdf?src-supplier=Farnell; ComponentLink4URL: https://datasheet.octopart.com/PTS815SJM250SMTRLFS-C%26K-Components-datasheet-166147782.pdf?src-supplier=TME; ComponentLink4Description: https://datasheet.octopart.com/PTS815SJM250SMTRLFS-C%26K-Components-datasheet-166147782.pdf?src-supplier=TME; .SCHChecked: *; .PCBChecked: *
footprint PTS526SK15SMTR2_LFS
pins: 1 COM_1, 2 COM_2, 3 NO_1, 4 NO_2

## RASPBERRY_PI_PICO
designator U?
MCU Module - Raspberry Pi Board, Arm Cortex-M0+; Core Architecture:Arm; Core Sub-Architecture:Cortex-M0+; Kit Contents:Raspberry Pi Pico Board; No. Of Bits:32Bit; Silicon Core Number:Rp2040; Silicon Manufacturer:Raspberry Pi |Raspberry-Pi RASPBERRY PI PICO; .Mounting: SMD or PTH variant; SnapEDA_Link: https://www.snapeda.com/parts/RASPBERRY%20PI%20PICO/Raspberry+Pi/view-part/?ref=snap; Package: None; Value: *; MF: Raspberry Pi; MP: RASPBERRY PI PICO; Check_prices: https://www.snapeda.com/parts/RASPBERRY%20PI%20PICO/Raspberry+Pi/view-part/?ref=eda; .PCBChecked: *; .SCHChecked: *
footprint RASPBERRY_PI_PICO
pins: 3V3, 3V3_EN, ADC_VREF, AGND, GND, GND, GND, GND, GND, GND, GND, GP0, GP1, GP2, GP3, GP4, GP5, GP6, GP7, GP8, GP9, GP10, GP11, GP12, GP13, GP14, GP15, GP16, GP17, GP18, GP19, GP20, GP21, GP22, GP26_A0, GP27_A1, GP28_A2, RUN, VBUS, VSYS

## RC0402FR-0720KL
designator R?, comment 20K
RES - 20K 1/16W 0402 ±1%; Manufacturer 1: Yageo Group; Manufacturer Part Number 1: RC0402FR-0720KL; Max Power Dissipation: 63mW; Power Rating: 62.5mW; Value: 20kΩ; Temperature Coefficient: 100ppm/°C; Voltage Rating: 50V; .Mounting: SMD; Supplier: Avnet; Supplier Part Number: RC0402FR-0720KL; RoHS: Compliant; Category: Chip SMD Resistors; Stock: 1020000; Pricing: 10000=0,0009, 20000=0,00088, 40000=0,00087, 80000=0,00087, 160000=0,00086 (USD); Case/Package: 0402; Case Code (Imperial): 0402; China RoHS: Non-Compliant; Composition: Thick Film; Depth: 500µm; Features: Moisture Resistant; Height: 350µm; Lead Free: Lead Free; Length: 1mm; Lifecycle Status: Production; Max Operating Temperature: 155°C; Military Standard: Not; Min Operating Temperature: -55°C; Mounting Technology: Surface Mount; Pins: 2; Number of Terminals: 2; Number of Terminations: 2; Packaging: Tape & Reel; REACH SVHC: Yes; Schedule B: 8533210045, 8533210045|8533210045|8533210045|8533210045|8533210045|8533210045|8533210045|8533210045|8533210045|8533210045|8533210045|8533210045|8533210045|8533210045|8533210045|8533210045|8533210045|8533210045|8533210045|8533210045|8533210045|8533210045|8533210045|85; Termination: SMD/SMT; Tolerance: 1%; Voltage Rating (DC): 50V; Width: 500µm; Working Voltage: 50V; ComponentLink1URL: https://datasheet.octopart.com:443/RC0402FR-0720KL-Yageo-datasheet-175887523.pdf?src-supplier=IHS; ComponentLink1Description: https://datasheet.octopart.com:443/RC0402FR-0720KL-Yageo-datasheet-175887523.pdf?src-supplier=IHS; ComponentLink2URL: https://datasheet.octopart.com:443/RC0402FR-0720KL-Yageo-datasheet-10408619.pdf?src-supplier=Upverter; ComponentLink2Description: https://datasheet.octopart.com:443/RC0402FR-0720KL-Yageo-datasheet-10408619.pdf?src-supplier=Upverter; ComponentLink3URL: https://datasheet.octopart.com:443/RC0402FR-0720KL-Yageo-datasheet-164759695.pdf?src-supplier=Upverter; ComponentLink3Description: https://datasheet.octopart.com:443/RC0402FR-0720KL-Yageo-datasheet-164759695.pdf?src-supplier=Upverter; ComponentLink4URL: https://datasheet.octopart.com:443/RC0402FR-0720KL-Yageo-datasheet-79472498.pdf?src-supplier=Upverter; ComponentLink4Description: https://datasheet.octopart.com:443/RC0402FR-0720KL-Yageo-datasheet-79472498.pdf?src-supplier=Upverter; ComponentLink5URL: https://datasheet.octopart.com:443/RC0402FR-0720KL-Yageo-datasheet-103092701.pdf?src-supplier=Upverter; ComponentLink5Description: https://datasheet.octopart.com:443/RC0402FR-0720KL-Yageo-datasheet-103092701.pdf?src-supplier=Upverter; ComponentLink6URL: https://sigma.octopart.com:443/138820526/technical_drawing/Yageo-RC0402FR-0720KL.pdf?src-supplier=Upverter; ComponentLink6Description: https://sigma.octopart.com:443/138820526/technical_drawing/Yageo-RC0402FR-0720KL.pdf?src-supplier=Upverter; ComponentLink7URL: https://datasheet.octopart.com:443/RC0402FR-0720KL-Yageo-Group-datasheet-190305687.pdf?src-supplier=Future+Electronics; ComponentLink7Description: https://datasheet.octopart.com:443/RC0402FR-0720KL-Yageo-Group-datasheet-190305687.pdf?src-supplier=Future+Electronics; ComponentLink8URL: https://datasheet.octopart.com:443/RC0402FR-0720KL-Yageo-datasheet-137700087.pdf?src-supplier=Future+Electronics; ComponentLink8Description: https://datasheet.octopart.com:443/RC0402FR-0720KL-Yageo-datasheet-137700087.pdf?src-supplier=Future+Electronics; ComponentLink9URL: https://datasheet.octopart.com:443/RC0402FR-0720KL-Yageo-datasheet-12531192.pdf?src-supplier=Future+Electronics; ComponentLink9Description: https://datasheet.octopart.com:443/RC0402FR-0720KL-Yageo-datasheet-12531192.pdf?src-supplier=Future+Electronics; ComponentLink10URL: https://datasheet.octopart.com:443/RC0402FR-0720KL-Yageo-datasheet-8324255.pdf?src-supplier=Future+Electronics; ComponentLink10Description: https://datasheet.octopart.com:443/RC0402FR-0720KL-Yageo-datasheet-8324255.pdf?src-supplier=Future+Electronics; ComponentLink11URL: https://datasheet.octopart.com:443/RC0402FR-0720KL-Yageo-datasheet-62067350.pdf?src-supplier=Farnell; ComponentLink11Description: https://datasheet.octopart.com:443/RC0402FR-0720KL-Yageo-datasheet-62067350.pdf?src-supplier=Farnell; ComponentLink12URL: https://datasheet.octopart.com:443/RC0402FR-0720KL-Yageo-Group-datasheet-176638170.pdf?src-supplier=Newark; ComponentLink12Description: https://datasheet.octopart.com:443/RC0402FR-0720KL-Yageo-Group-datasheet-176638170.pdf?src-supplier=Newark; ComponentLink13URL: https://datasheet.octopart.com:443/RC0402FR-0720KL-Yageo-datasheet-148775077.pdf?src-supplier=TME; ComponentLink13Description: https://datasheet.octopart.com:443/RC0402FR-0720KL-Yageo-datasheet-148775077.pdf?src-supplier=TME; ComponentLink14URL: https://datasheet.octopart.com/RC0402FR-0720KL-Yageo-datasheet-73766026.pdf; ComponentLink14Description: https://datasheet.octopart.com/RC0402FR-0720KL-Yageo-datasheet-73766026.pdf; ComponentLink15URL: https://datasheet.octopart.com:443/RC0402FR-0720KL-Yageo-datasheet-8329306.pdf?src-supplier=element14; ComponentLink15Description: https://datasheet.octopart.com:443/RC0402FR-0720KL-Yageo-datasheet-8329306.pdf?src-supplier=element14; ComponentLink16URL: http://sigma.octopart.com:80/conflict_mineral_statement/Yageo-company-3.pdf?src-supplier=Compliance+Statements; ComponentLink16Description: http://sigma.octopart.com:80/conflict_mineral_statement/Yageo-company-3.pdf?src-supplier=Compliance+Statements; ComponentLink17URL: http://sigma.octopart.com:80/rohs_statement/Yageo-company-2.pdf?src-supplier=Compliance+Statements; ComponentLink17Description: http://sigma.octopart.com:80/rohs_statement/Yageo-company-2.pdf?src-supplier=Compliance+Statements; .SCHChecked: *; .PCBChecked: *
footprint R0402 - IronSolder (R0402 but easier to solder with iron solder instead of an furnace or heat bed)
pins: 1, 2

## RC1005F103CS
designator R?, comment 10K
RES - 10K 1/16W 0402 ±1% Chip Resistor; Manufacturer 1: Samsung; Manufacturer Part Number 1: RC1005F103CS; Power: 60mW; Value: 10kR; Working Voltage: 50V; Temperature Coefficient (ppm/Cel): 100; Package Height: 0.35mm; Package Length: 1mm; Package Width: 0.5mm; .Mounting: SMT; Supplier: Digikey; Supplier Part Number: 1276-3431-1-ND; RoHS: Yes; Category: Chip SMD Resistors; Stock: 10935408; Pricing: 1=0,1, 10=0,039, 100=0,0201, 1000=0,01175, 2500=0,0099, 5000=0,00882 (USD); Mounting Technology: Surface Mount; Pins: 2; Package Shape: Rectangular; Case/Package: 0402; Terminal Finish: Nickel; Min Operating Temperature: -55°C; Max Operating Temperature: 125°C; Tolerance: 1%; JESD-609 Code: e3; Resistor Type: FIXED RESISTOR; Construction: Chip; Packaging: Tape and Reel; Technology: METAL GLAZE/THICK FILM; Reach SVHC Compliant: Yes; RoHS Compliant: Yes; ComponentLink1URL: https://datasheet.ciiva.com:443/pdfs/VipMasterIC/IC/SEMS/SEMS-S-A0001326806/SEMS-S-A0001326806-1.pdf?src-supplier=IHS+Markit; ComponentLink1Description: https://datasheet.ciiva.com:443/pdfs/VipMasterIC/IC/SEMS/SEMS-S-A0001326806/SEMS-S-A0001326806-1.pdf?src-supplier=IHS+Markit; ComponentLink2URL: https://datasheet.ciiva.com/15196/getdatasheetpartid-504789-15196214.pdf?src-supplier=Verical; ComponentLink2Description: https://datasheet.ciiva.com/15196/getdatasheetpartid-504789-15196214.pdf?src-supplier=Verical; ComponentLink3URL: https://datasheet.ciiva.com/16481/rcseries-16481007.pdf?src-supplier=Future+Electronics; ComponentLink3Description: https://datasheet.ciiva.com/16481/rcseries-16481007.pdf?src-supplier=Future+Electronics; .PCBChecked: *; .SCHChecked: *
footprint R0402 - IronSolder (R0402 but easier to solder with iron solder instead of an furnace or heat bed)
pins: 1, 2

## Resistor_0201
designator R?, comment TBD
Resistor - TBD 0201
footprint R0201
pins: 1, 2

## Resistor_0402
designator R?, comment TBD
Resistor - TBD 0402
footprint R0402
pins: 1, 2

## Resistor_0603
designator R?, comment TBD
Resistor - TBD 0603
footprint R0603
pins: 1, 2

## Resistor_0805
designator R?, comment TBD
Resistor - TBD 0805
footprint R0805
pins: 1, 2

## Resistor_1206
designator R?, comment TBD
Resistor - TBD 1206
footprint R1206
pins: 1, 2

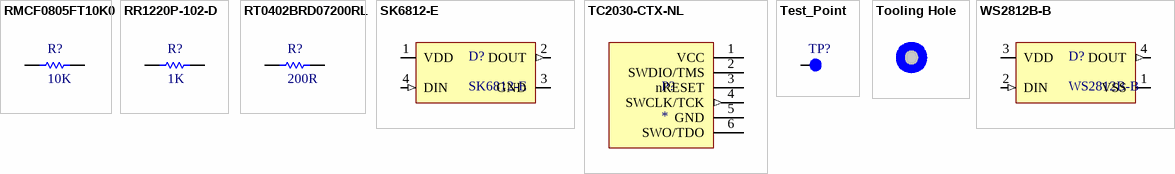
[diagram p1: symbols RMCF0805FT10K0 to WS2812B-B]

## RMCF0805FT10K0
designator R?, comment 10K
RES - 10K 1/16W 0805 ±1% Chip Resistor; Manufacturer: Stackpole Electronics; Manufacturer Part Number: RMCF0805FT10K0; Manufacturer Package Identifier: 0805 (2012 metric); Max Power Dissipation: 125mW; Value: 10kΩ; Temperature Coefficient: 100ppm/°C; Voltage Rating: 150V; .Mounting: SMD; Supplier: Future Electronics; Supplier Part Number: RMCF0805FT10K0; RoHS: Compliant; Category: Chip SMD Resistors; Stock: 3170000; Pricing: 10000=0,0027, 25000=0,0027, 100000=0,0026, 150000=0,0025, 375000=0,0024 (USD); Case/Package: 0805; Case Code (Imperial): 0805; Case Code (Metric): 2012; China RoHS: Non-Compliant; Composition: Thick Film; Contact Plating: Tin; Depth: 1.25mm; Features: Automotive AEC-Q200; Height: 500µm; Lead Free: Lead Free; Length: 2mm; Lifecycle Status: Production; Max Operating Temperature: 155°C; Military Standard: Not; Min Operating Temperature: -55°C; Mounting Technology: Surface Mount; Number of Terminals: 2; Number of Terminations: 2; Packaging: Cut Tape (CT); Power Rating: 125mW; Radiation Hardening: No; Ratings: AEC-Q200; REACH SVHC: Yes; Schedule B: 8533210045, 8533210045|8533210045, 8533210045|8533210045|8533210045, 8533210045|8533210045|8533210045|8533210045; Tolerance: 1%; Width: 1.25mm; Working Voltage: 150V; ComponentLink1URL: https://datasheet.octopart.com:443/RMCF0805FT10K0-Stackpole-Electronics-datasheet-182148065.pdf?src-supplier=IHS; ComponentLink1Description: https://datasheet.octopart.com:443/RMCF0805FT10K0-Stackpole-Electronics-datasheet-182148065.pdf?src-supplier=IHS; ComponentLink2URL: https://datasheet.octopart.com:443/RMCF0805FT10K0-Stackpole-Electronics-datasheet-12534581.pdf?src-supplier=Upverter; ComponentLink2Description: https://datasheet.octopart.com:443/RMCF0805FT10K0-Stackpole-Electronics-datasheet-12534581.pdf?src-supplier=Upverter; ComponentLink3URL: https://datasheet.octopart.com:443/RMCF0805FT10K0-Stackpole-Electronics-datasheet-12510902.pdf?src-supplier=Upverter; ComponentLink3Description: https://datasheet.octopart.com:443/RMCF0805FT10K0-Stackpole-Electronics-datasheet-12510902.pdf?src-supplier=Upverter; ComponentLink4URL: https://datasheet.octopart.com:443/RMCF0805FT10K0-Stackpole-Electronics-datasheet-28504820.pdf?src-supplier=Master+Electronics; ComponentLink4Description: https://datasheet.octopart.com:443/RMCF0805FT10K0-Stackpole-Electronics-datasheet-28504820.pdf?src-supplier=Master+Electronics; ComponentLink5URL: https://datasheet.octopart.com:443/RMCF0805FT10K0-Stackpole-Electronics-datasheet-141193804.pdf?src-supplier=Stackpole+Electronics; ComponentLink5Description: https://datasheet.octopart.com:443/RMCF0805FT10K0-Stackpole-Electronics-datasheet-141193804.pdf?src-supplier=Stackpole+Electronics; ComponentLink6URL: https://datasheet.octopart.com:443/RMCF0805FT10K0-Stackpole-Electronics-datasheet-62091608.pdf?src-supplier=Stackpole+Electronics; ComponentLink6Description: https://datasheet.octopart.com:443/RMCF0805FT10K0-Stackpole-Electronics-datasheet-62091608.pdf?src-supplier=Stackpole+Electronics; ComponentLink7URL: https://datasheet.octopart.com:443/RMCF0805FT10K0-Stackpole-Electronics-datasheet-10788263.pdf?src-supplier=Stackpole+Electronics; ComponentLink7Description: https://datasheet.octopart.com:443/RMCF0805FT10K0-Stackpole-Electronics-datasheet-10788263.pdf?src-supplier=Stackpole+Electronics; ComponentLink8URL: https://datasheet.octopart.com:443/RMCF0805FT10K0-Stackpole-Electronics-datasheet-154799224.pdf?src-supplier=JRH+Electronics; ComponentLink8Description: https://datasheet.octopart.com:443/RMCF0805FT10K0-Stackpole-Electronics-datasheet-154799224.pdf?src-supplier=JRH+Electronics; ComponentLink9URL: https://datasheet.octopart.com:443/RMCF0805FT10K0-Stackpole-Electronics-datasheet-11546843.pdf?src-supplier=Arrow+Electronics; ComponentLink9Description: https://datasheet.octopart.com:443/RMCF0805FT10K0-Stackpole-Electronics-datasheet-11546843.pdf?src-supplier=Arrow+Electronics; ComponentLink10URL: https://datasheet.octopart.com:443/RMCF0805FT10K0-Stackpole-Electronics-datasheet-11547379.pdf?src-supplier=Future+Electronics; ComponentLink10Description: https://datasheet.octopart.com:443/RMCF0805FT10K0-Stackpole-Electronics-datasheet-11547379.pdf?src-supplier=Future+Electronics; ComponentLink11URL: https://datasheet.octopart.com:443/RMCF0805FT10K0-Stackpole-Electronics-datasheet-8359789.pdf?src-supplier=Future+Electronics; ComponentLink11Description: https://datasheet.octopart.com:443/RMCF0805FT10K0-Stackpole-Electronics-datasheet-8359789.pdf?src-supplier=Future+Electronics; ComponentLink12URL: https://datasheet.octopart.com:443/RMCF0805FT10K0-Stackpole-Electronics-datasheet-8324226.pdf?src-supplier=Future+Electronics; ComponentLink12Description: https://datasheet.octopart.com:443/RMCF0805FT10K0-Stackpole-Electronics-datasheet-8324226.pdf?src-supplier=Future+Electronics; ComponentLink13URL: https://datasheet.octopart.com:443/RMCF0805FT10K0-Stackpole-Electronics-datasheet-8088878.pdf?src-supplier=Future+Electronics; ComponentLink13Description: https://datasheet.octopart.com:443/RMCF0805FT10K0-Stackpole-Electronics-datasheet-8088878.pdf?src-supplier=Future+Electronics; ComponentLink14URL: https://datasheet.octopart.com:443/RMCF0805FT10K0-Stackpole-Electronics-datasheet-5313682.pdf?src-supplier=Future+Electronics; ComponentLink14Description: https://datasheet.octopart.com:443/RMCF0805FT10K0-Stackpole-Electronics-datasheet-5313682.pdf?src-supplier=Future+Electronics; ComponentLink15URL: http://sigma.octopart.com:80/15940719/materials_sheet/Stackpole-Electronics-RMCF0805FT10K0.pdf?src-supplier=Compliance+Statements; ComponentLink15Description: http://sigma.octopart.com:80/15940719/materials_sheet/Stackpole-Electronics-RMCF0805FT10K0.pdf?src-supplier=Compliance+Statements; ComponentLink16URL: http://sigma.octopart.com:80/141158211/reach_statement/Stackpole-Electronics-RMCF0805FT10K0.pdf?src-supplier=Compliance+Statements; ComponentLink16Description: http://sigma.octopart.com:80/141158211/reach_statement/Stackpole-Electronics-RMCF0805FT10K0.pdf?src-supplier=Compliance+Statements; ComponentLink17URL: http://sigma.octopart.com:80/141158212/rohs_statement/Stackpole-Electronics-RMCF0805FT10K0.pdf?src-supplier=Compliance+Statements; ComponentLink17Description: http://sigma.octopart.com:80/141158212/rohs_statement/Stackpole-Electronics-RMCF0805FT10K0.pdf?src-supplier=Compliance+Statements; .SCHChecked: *; .PCBChecked: *
footprint R0805 - ironsoldering
pins: 1, 2

## RR1220P-102-D
designator R?, comment 1K
RES - 1K 0.1W 0805 ±0.5% Chip Resistor; Manufacturer: Susumu; Manufacturer Part Number: RR1220P-102-D; Manufacturer Package Identifier: 0805 (2012 metric); Max Power Dissipation: 100mW; Value: 1kΩ; Temperature Coefficient: 25ppm/°C; Voltage Rating: 100V; .Mounting: SMD; Supplier: Future Electronics; Supplier Part Number: RR1220P-102-D; RoHS: Compliant; Category: Chip SMD Resistors; Stock: 25000; Pricing: 5000=0,0159, 15000=0,0155, 25000=0,0153, 50000=0,0151, 100000=0,0147 (USD); Case/Package: 0805; Case Code (Imperial): 0805; Composition: Thin Film; Country of Origin: Mainland China, Japan; Depth: 1.25mm; Export Control Classification Number (ECCN) Code: EAR99; Height: 400µm; Harmonized Tariff Schedule (HTS) Code: 8533.21.00.30; Introduction Date: 2004-01-27; Lead Free: Lead Free; Length: 2mm; Lifecycle Status: NRND; Max Operating Temperature: 125°C; Min Operating Temperature: -55°C; Mounting Technology: Surface Mount; Pins: 2; Number of Terminals: 2; Number of Terminations: 2; Packaging: Cut Tape; Power Rating: 100mW; REACH SVHC: No; Termination: SMD/SMT; Tolerance: 0.5%; Voltage Rating (DC): 100V; Width: 1.25mm; Working Voltage: 100V; ComponentLink1URL: https://datasheet.octopart.com:443/RR1220P-102-D-Susumu-datasheet-159770900.pdf?src-supplier=Newark; ComponentLink1Description: https://datasheet.octopart.com:443/RR1220P-102-D-Susumu-datasheet-159770900.pdf?src-supplier=Newark; ComponentLink2URL: https://datasheet.octopart.com:443/RR1220P-102-D-Susumu-datasheet-5302462.pdf?src-supplier=Newark; ComponentLink2Description: https://datasheet.octopart.com:443/RR1220P-102-D-Susumu-datasheet-5302462.pdf?src-supplier=Newark; ComponentLink3URL: https://datasheet.octopart.com:443/RR1220P-102-D-Susumu-datasheet-722.pdf?src-supplier=Newark; ComponentLink3Description: https://datasheet.octopart.com:443/RR1220P-102-D-Susumu-datasheet-722.pdf?src-supplier=Newark; ComponentLink4URL: https://datasheet.octopart.com:443/RR1220P-102-D-Susumu-datasheet-78834971.pdf?src-supplier=Farnell; ComponentLink4Description: https://datasheet.octopart.com:443/RR1220P-102-D-Susumu-datasheet-78834971.pdf?src-supplier=Farnell; ComponentLink5URL: https://datasheet.octopart.com:443/RR1220P-102-D-Susumu-datasheet-10941792.pdf?src-supplier=element14+APAC; ComponentLink5Description: https://datasheet.octopart.com:443/RR1220P-102-D-Susumu-datasheet-10941792.pdf?src-supplier=element14+APAC; ComponentLink6URL: https://datasheet.octopart.com:443/RR1220P-102-D-Susumu-datasheet-62069792.pdf?src-supplier=Future+Electronics; ComponentLink6Description: https://datasheet.octopart.com:443/RR1220P-102-D-Susumu-datasheet-62069792.pdf?src-supplier=Future+Electronics; ComponentLink7URL: https://datasheet.octopart.com:443/RR1220P-102-D-Susumu-datasheet-11047391.pdf?src-supplier=Future+Electronics; ComponentLink7Description: https://datasheet.octopart.com:443/RR1220P-102-D-Susumu-datasheet-11047391.pdf?src-supplier=Future+Electronics; ComponentLink8URL: https://datasheet.octopart.com:443/RR1220P-102-D-Susumu-datasheet-118815.pdf?src-supplier=DigiKey; ComponentLink8Description: https://datasheet.octopart.com:443/RR1220P-102-D-Susumu-datasheet-118815.pdf?src-supplier=DigiKey; .PCBChecked: *; .SCHChecked: *
footprint R0805 - ironsoldering
pins: 1, 2